# Altium schematic symbol library SW - PTS810 SJM 250 SMTR LFS.SchLib: 1 symbol
Pins are listed as number, name and electrical type; pins without a type are passive.

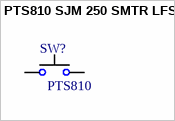
[diagram p0: symbol PTS810 SJM 250 SMTR LFS]

## PTS810 SJM 250 SMTR LFS
designator SW?, comment PTS810
Tactile Switch SPST-NO Top Actuated Surface Mount; Manufacturer: C&K; Manufacturer Part Number: PTS810 SJM 250 SMTR LFS; Supplier 1: DigiKey; Supplier Part Number 1: CKN10502CT-ND; Supplier 2: LCSC; Supplier Part Number 2: C116501; Category: Tactile Switches; Case/Package: 4.20mm x 3.20mm; Operating Temperature: -40°C ~ 85°C; Lifecycle Status: Active; ComponentLink1Description: Datasheet; ComponentLink1URL: https://www.littelfuse.com/assetdocs/littelfuse-c-k-tactile-pts810-series-datasheet?assetguid=f1e4bc97-66e9-4beb-99c6-eaef0bd3bff4; ComponentLink2Description: DigiKey; ComponentLink2URL: https://www.digikey.com/en/products/result?keywords=PTS810%20SJM%20250%20SMTR%20LFS
footprint PTS810 - CK (Huella PTS810 - CK)
pins: 1, 2